# Altium integrated library C0402C101J1GACAUTO.IntLib: 1 symbol
Pins are listed as number, name and electrical type; pins without a type are passive.

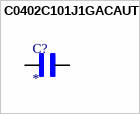
[diagram p0: symbol C0402C101J1GACAUTO]

## C0402C101J1GACAUTO
designator C?
MF: {'manufacturer': u'KEMET'}; MP: C0402C101J1GACAUTO; Package: None; Price: None; Value: *; Availability: Unavailable
footprint CAPC1005X55N
pins: 1, 2